# Altium schematic symbol library DIO7003HEST5.SchLib: 1 symbol
Pins are listed as number, name and electrical type; pins without a type are passive.

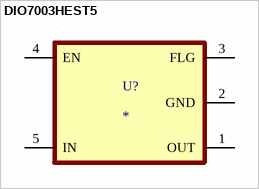
[diagram p0: symbol DIO7003HEST5]

## DIO7003HEST5
designator U?
Low-loss 5.5V power distribution switch with 2A continuous output current, 2.5A current limit, active-high enable, overcurrent protection, short-circuit protection, thermal protection, reverse-current blocking, and undervoltage lockout. Package: SOT-23-5.; MF: Texas Instruments; MP: SN74LVC1G08DBVTE4; SnapEDA_Link: https://www.snapeda.com/parts/SN74LVC1G08DBVTE4/Texas+Instruments/view-part/?ref=snap; Package: SOT-23-5 Texas Instruments; Value: *; Check_prices: https://www.snapeda.com/parts/SN74LVC1G08DBVTE4/Texas+Instruments/view-part/?ref=eda
footprint SOT95P280X145-5N
pins: 1 OUT (power), 2 GND, 3 FLG, 4 EN, 5 IN (power)